# Altium schematic symbol library 2.2µF_100V、X7R、1210.SCHLIB: 1 symbol
Pins are listed as number, name and electrical type; pins without a type are passive.

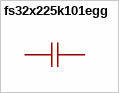
[diagram p0: symbol fs32x225k101egg]

## fs32x225k101egg
designator C??  (value not drawn)
容值:2.2uF;精度:±10%;额定电压:100V;温度系数:X7R;; Manufacturer: PSA(信昌电陶); AddInBom: yes; ModelId: 833068e7fe044595a6eec77c56179455; ModelName: C1210_L3.2-W2.5-H2.5; ModelTransform: 125.984,98.425,0,0,0,0,0,0,0; Value: 2.2uF; Tolerance: ±10%; Voltage Rating: 100V; Temperature Coefficient: X7R; Symbol: FS32X225K101EGG; LCSC Part Name: 2.2uF ±10% 100V; SupplierPart: C153036; ManufacturerPart: FS32X225K101EGG; Supplier Footprint: 1210; JLCPCB Part Class: Extended Part; Datasheet: https://item.szlcsc.com/datasheet/FS32X225K101EGG/164378.html; Supplier: LCSC; ConvertToPcb: yes; FootprintName: C1210
footprint C1210
pins: 1, 2